# Altium schematic symbol library ISO6541FQDBQRQ1.SchLib: 1 symbol
Pins are listed as number, name and electrical type; pins without a type are passive.

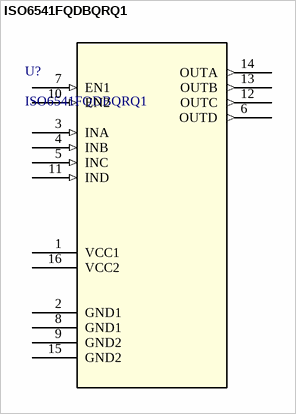
[diagram p0: symbol ISO6541FQDBQRQ1]

## ISO6541FQDBQRQ1
designator U?
Automotive, ultra-small, galvanic 4-channel, 3/1, digital isolator with 50Mbps & 1.8V logic support 16-SSOP -40 to 125; Manufacturer_Name: Texas Instruments; Copyright: Copyright (C) 2026 Ultra Librarian. All rights reserved.; Manufacturer_Part_Number: ISO6541FQDBQRQ1; Datasheet: https://www.ti.com/lit/gpn/iso6541-q1; RefDes: RefDes; Type: Type
footprint SSOP16_3P98X5_TEX
pins: 1 VCC1 (power), 2 GND1 (power), 3 INA (in), 4 INB (in), 5 INC (in), 6 OUTD (out), 7 EN1 (in), 8 GND1 (power), 9 GND2 (power), 10 EN2 (in), 11 IND (in), 12 OUTC (out), 13 OUTB (out), 14 OUTA (out), 15 GND2 (power), 16 VCC2 (power)